# Altium footprint library Package_DFN_QFN.PcbLib: 735 footprints (part 46 of 46)
Each footprint in its own frame and in the unit in brackets; x right, y up, seen from the top. Pads: shape width x height; smd on the part's side, far side on the other; paste and mask are expansions set on the pad; w line width, h text height; cw(c..) or ccw(c..) is an arc to the next point about the centre after c.
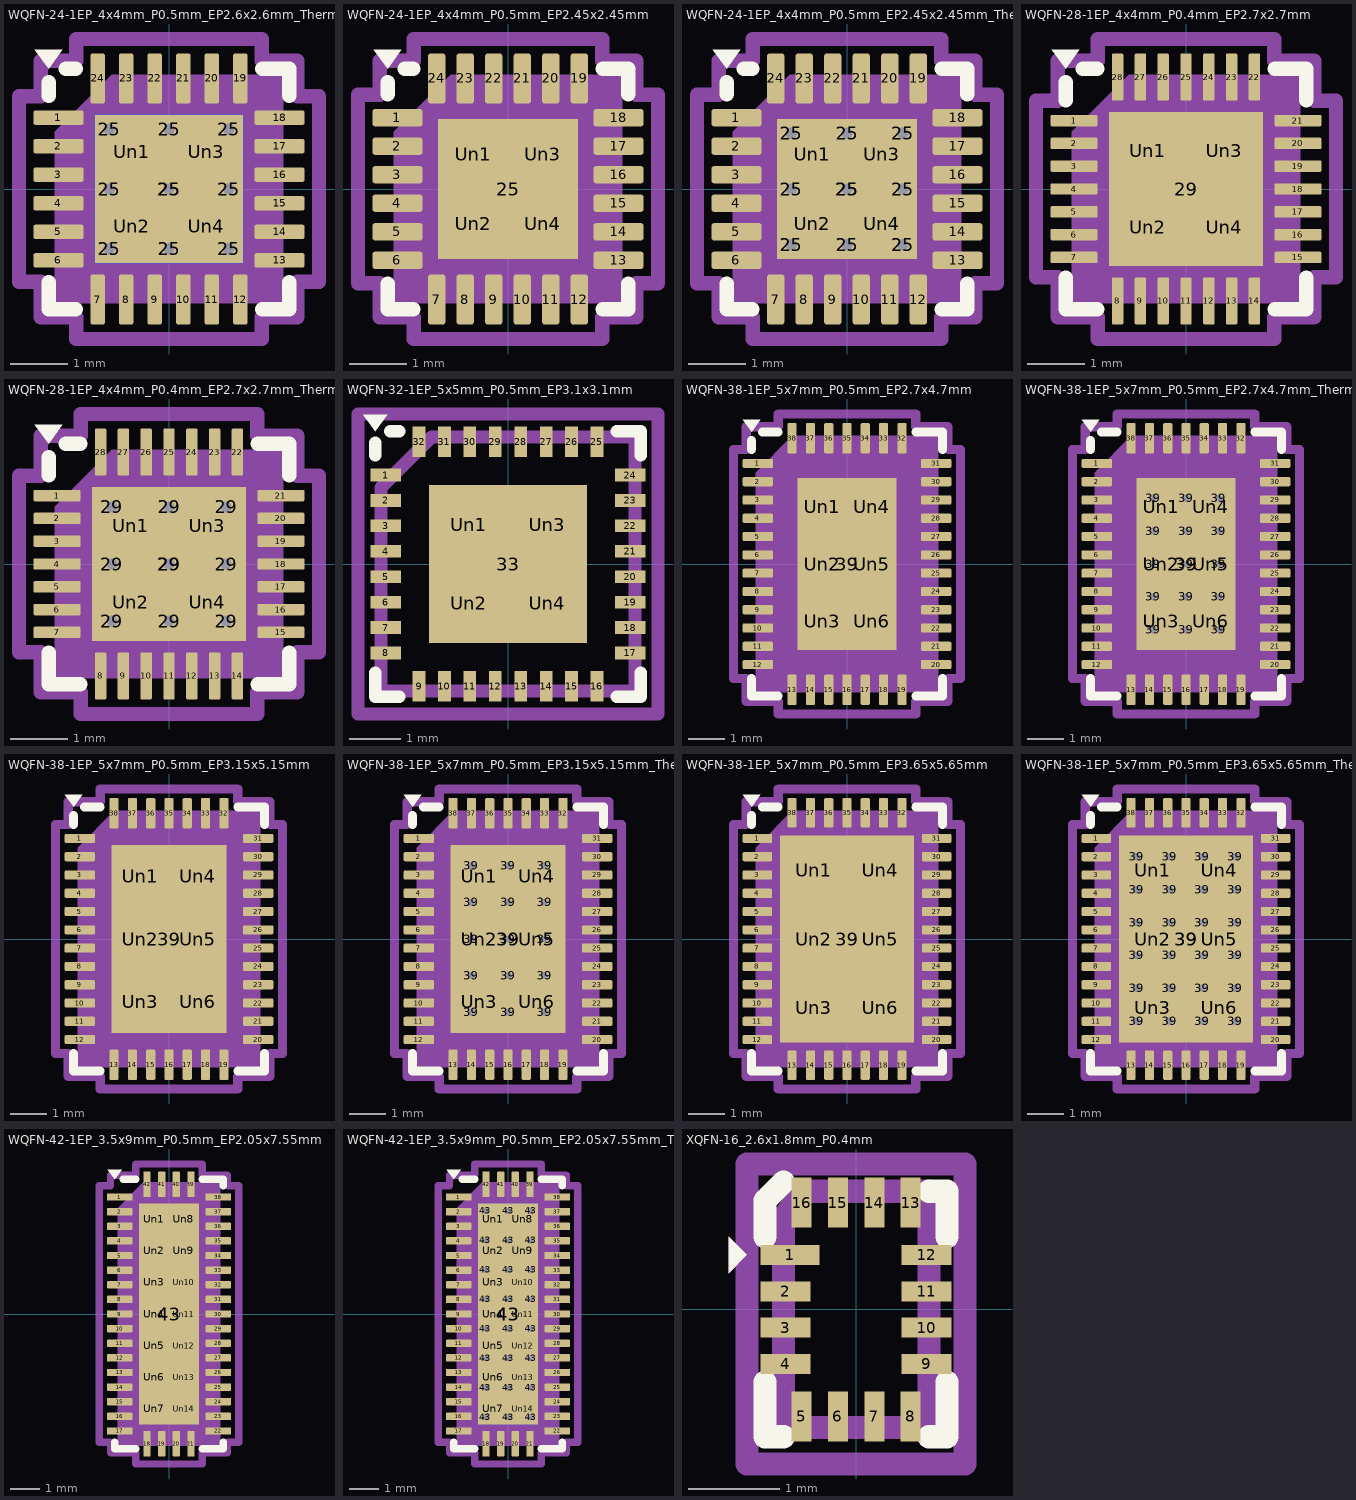
[diagram p45: the footprints below, top view; thin cyan lines are the x and y axes]

## WQFN-24-1EP_4x4mm_P0.5mm_EP2.6x2.6mm_ThermalVias [mm] "WQFN-24-1EP_4x4mm_P0.5mm_EP2.6x2.6mm_ThermalVias"
pads (39):
  rrect25% 0.875x0.25 smd: 1(-1.937,1.25) 2(-1.937,0.75) 3(-1.937,0.25) 4(-1.937,-0.25) 5(-1.937,-0.75) 6(-1.937,-1.25) 13(1.937,-1.25) 14(1.937,-0.75) 15(1.937,-0.25) 16(1.937,0.25) 17(1.937,0.75) 18(1.937,1.25)
  rrect25% 0.25x0.875 smd: 7(-1.25,-1.937) 8(-0.75,-1.937) 9(-0.25,-1.937) 10(0.25,-1.937) 11(0.75,-1.937) 12(1.25,-1.937) 19(1.25,1.937) 20(0.75,1.937) 21(0.25,1.937) 22(-0.25,1.937) 23(-0.75,1.937) 24(-1.25,1.937)
  round 0.5 hole 0.2: 25(-1.05,-1.05) 25(-1.05,0) 25(-1.05,1.05) 25(0,-1.05) 25(0,0) 25(0,1.05) 25(1.05,-1.05) 25(1.05,0) 25(1.05,1.05)
  rect 2.6x2.6 smd: 25(0,0)
  rect 2.6x2.6 smd far side: 25(0,0)
  rrect22% 1.13x1.13 on Top Paste: Un1(-0.65,0.65) Un2(-0.65,-0.65) Un3(0.65,0.65) Un4(0.65,-0.65)
F.SilkS:
  region: -2.11,2.11 -2.35,2.44 -1.87,2.44
  lines w0.254: -2.11,-1.635 -2.11,-2.11 -1.635,-2.11 ; -2.11,1.635 -2.11,1.87 ; -1.81,2.11 -1.635,2.11 ; 1.635,-2.11 2.11,-2.11 2.11,-1.635 ; 1.635,2.11 2.11,2.11 2.11,1.635
Top Component Center:
  lines w0.127: -0.127,0 0.127,0 -0.127,0 ; 0,-0.127 0,0.127 0,-0.127
Top Assembly:
  region: 2,-2 -2,-2 -2,1 -1,2 2,2
Top Courtyard:
  lines w0.254: -2.63,-1.63 -2.25,-1.63 -2.25,-2.25 -1.63,-2.25 -1.63,-2.63 1.63,-2.63 1.63,-2.25 2.25,-2.25 2.25,-1.63 2.63,-1.63 2.63,1.63 2.25,1.63 2.25,2.25 1.63,2.25 1.63,2.63 -1.63,2.63 -1.63,2.25 -2.25,2.25 -2.25,1.63 -2.63,1.63 -2.63,-1.63
Top Designator:
  text ".Designator" at -3.43,-0.344 h1.52

## WQFN-24-1EP_4x4mm_P0.5mm_EP2.45x2.45mm [mm] "WQFN-24-1EP_4x4mm_P0.5mm_EP2.45x2.45mm"
pads (29):
  rrect25% 0.875x0.3 smd: 1(-1.937,1.25) 2(-1.937,0.75) 3(-1.937,0.25) 4(-1.937,-0.25) 5(-1.937,-0.75) 6(-1.937,-1.25) 13(1.937,-1.25) 14(1.937,-0.75) 15(1.937,-0.25) 16(1.937,0.25) 17(1.937,0.75) 18(1.937,1.25)
  rrect25% 0.3x0.875 smd: 7(-1.25,-1.937) 8(-0.75,-1.937) 9(-0.25,-1.937) 10(0.25,-1.937) 11(0.75,-1.937) 12(1.25,-1.937) 19(1.25,1.937) 20(0.75,1.937) 21(0.25,1.937) 22(-0.25,1.937) 23(-0.75,1.937) 24(-1.25,1.937)
  rect 2.45x2.45 smd: 25(0,0)
  rrect25% 0.99x0.99 on Top Paste: Un1(-0.61,0.61) Un2(-0.61,-0.61) Un3(0.61,0.61) Un4(0.61,-0.61)
F.SilkS:
  region: -2.11,2.11 -2.35,2.44 -1.87,2.44
  lines w0.254: -2.11,-1.66 -2.11,-2.11 -1.66,-2.11 ; -2.11,1.66 -2.11,1.87 ; -1.81,2.11 -1.66,2.11 ; 1.66,-2.11 2.11,-2.11 2.11,-1.66 ; 1.66,2.11 2.11,2.11 2.11,1.66
Top Component Center:
  lines w0.127: -0.127,0 0.127,0 -0.127,0 ; 0,-0.127 0,0.127 0,-0.127
Top Assembly:
  region: 2,-2 -2,-2 -2,1 -1,2 2,2
Top Courtyard:
  lines w0.254: -2.63,-1.65 -2.25,-1.65 -2.25,-2.25 -1.65,-2.25 -1.65,-2.63 1.65,-2.63 1.65,-2.25 2.25,-2.25 2.25,-1.65 2.63,-1.65 2.63,1.65 2.25,1.65 2.25,2.25 1.65,2.25 1.65,2.63 -1.65,2.63 -1.65,2.25 -2.25,2.25 -2.25,1.65 -2.63,1.65 -2.63,-1.65
Top Designator:
  text ".Designator" at -3.43,-0.344 h1.52

## WQFN-24-1EP_4x4mm_P0.5mm_EP2.45x2.45mm_ThermalVias [mm] "WQFN-24-1EP_4x4mm_P0.5mm_EP2.45x2.45mm_ThermalVias"
pads (39):
  rrect25% 0.875x0.3 smd: 1(-1.937,1.25) 2(-1.937,0.75) 3(-1.937,0.25) 4(-1.937,-0.25) 5(-1.937,-0.75) 6(-1.937,-1.25) 13(1.937,-1.25) 14(1.937,-0.75) 15(1.937,-0.25) 16(1.937,0.25) 17(1.937,0.75) 18(1.937,1.25)
  rrect25% 0.3x0.875 smd: 7(-1.25,-1.937) 8(-0.75,-1.937) 9(-0.25,-1.937) 10(0.25,-1.937) 11(0.75,-1.937) 12(1.25,-1.937) 19(1.25,1.937) 20(0.75,1.937) 21(0.25,1.937) 22(-0.25,1.937) 23(-0.75,1.937) 24(-1.25,1.937)
  round 0.5 hole 0.2: 25(-0.975,-0.975) 25(-0.975,0) 25(-0.975,0.975) 25(0,-0.975) 25(0,0) 25(0,0.975) 25(0.975,-0.975) 25(0.975,0) 25(0.975,0.975)
  rect 2.45x2.45 smd: 25(0,0)
  rect 2.45x2.45 smd far side: 25(0,0)
  rrect24% 1.06x1.06 on Top Paste: Un1(-0.61,0.61) Un2(-0.61,-0.61) Un3(0.61,0.61) Un4(0.61,-0.61)
F.SilkS:
  region: -2.11,2.11 -2.35,2.44 -1.87,2.44
  lines w0.254: -2.11,-1.66 -2.11,-2.11 -1.66,-2.11 ; -2.11,1.66 -2.11,1.87 ; -1.81,2.11 -1.66,2.11 ; 1.66,-2.11 2.11,-2.11 2.11,-1.66 ; 1.66,2.11 2.11,2.11 2.11,1.66
Top Component Center:
  lines w0.127: -0.127,0 0.127,0 -0.127,0 ; 0,-0.127 0,0.127 0,-0.127
Top Assembly:
  region: 2,-2 -2,-2 -2,1 -1,2 2,2
Top Courtyard:
  lines w0.254: -2.63,-1.65 -2.25,-1.65 -2.25,-2.25 -1.65,-2.25 -1.65,-2.63 1.65,-2.63 1.65,-2.25 2.25,-2.25 2.25,-1.65 2.63,-1.65 2.63,1.65 2.25,1.65 2.25,2.25 1.65,2.25 1.65,2.63 -1.65,2.63 -1.65,2.25 -2.25,2.25 -2.25,1.65 -2.63,1.65 -2.63,-1.65
Top Designator:
  text ".Designator" at -3.43,-0.344 h1.52

## WQFN-28-1EP_4x4mm_P0.4mm_EP2.7x2.7mm [mm] "WQFN-28-1EP_4x4mm_P0.4mm_EP2.7x2.7mm"
pads (33):
  rrect25% 0.825x0.2 smd: 1(-1.963,1.2) 2(-1.963,0.8) 3(-1.963,0.4) 4(-1.963,0) 5(-1.963,-0.4) 6(-1.963,-0.8) 7(-1.963,-1.2) 15(1.963,-1.2) 16(1.963,-0.8) 17(1.963,-0.4) 18(1.963,0) 19(1.963,0.4) 20(1.963,0.8) 21(1.963,1.2)
  rrect25% 0.2x0.825 smd: 8(-1.2,-1.963) 9(-0.8,-1.963) 10(-0.4,-1.963) 11(0,-1.963) 12(0.4,-1.963) 13(0.8,-1.963) 14(1.2,-1.963) 22(1.2,1.963) 23(0.8,1.963) 24(0.4,1.963) 25(0,1.963) 26(-0.4,1.963) 27(-0.8,1.963) 28(-1.2,1.963)
  rect 2.7x2.7 smd: 29(0,0)
  rrect23% 1.09x1.09 on Top Paste: Un1(-0.675,0.675) Un2(-0.675,-0.675) Un3(0.675,0.675) Un4(0.675,-0.675)
F.SilkS:
  region: -2.11,2.11 -2.35,2.44 -1.87,2.44
  lines w0.254: -2.11,-1.56 -2.11,-2.11 -1.56,-2.11 ; -2.11,1.56 -2.11,1.87 ; -1.81,2.11 -1.56,2.11 ; 1.56,-2.11 2.11,-2.11 2.11,-1.56 ; 1.56,2.11 2.11,2.11 2.11,1.56
Top Component Center:
  lines w0.127: -0.127,0 0.127,0 -0.127,0 ; 0,-0.127 0,0.127 0,-0.127
Top Assembly:
  region: 2,-2 -2,-2 -2,1 -1,2 2,2
Top Courtyard:
  lines w0.254: -2.63,-1.55 -2.25,-1.55 -2.25,-2.25 -1.55,-2.25 -1.55,-2.63 1.55,-2.63 1.55,-2.25 2.25,-2.25 2.25,-1.55 2.63,-1.55 2.63,1.55 2.25,1.55 2.25,2.25 1.55,2.25 1.55,2.63 -1.55,2.63 -1.55,2.25 -2.25,2.25 -2.25,1.55 -2.63,1.55 -2.63,-1.55
Top Designator:
  text ".Designator" at -3.43,-0.344 h1.52

## WQFN-28-1EP_4x4mm_P0.4mm_EP2.7x2.7mm_ThermalVias [mm] "WQFN-28-1EP_4x4mm_P0.4mm_EP2.7x2.7mm_ThermalVias"
pads (43):
  rrect25% 0.825x0.2 smd: 1(-1.963,1.2) 2(-1.963,0.8) 3(-1.963,0.4) 4(-1.963,0) 5(-1.963,-0.4) 6(-1.963,-0.8) 7(-1.963,-1.2) 15(1.963,-1.2) 16(1.963,-0.8) 17(1.963,-0.4) 18(1.963,0) 19(1.963,0.4) 20(1.963,0.8) 21(1.963,1.2)
  rrect25% 0.2x0.825 smd: 8(-1.2,-1.963) 9(-0.8,-1.963) 10(-0.4,-1.963) 11(0,-1.963) 12(0.4,-1.963) 13(0.8,-1.963) 14(1.2,-1.963) 22(1.2,1.963) 23(0.8,1.963) 24(0.4,1.963) 25(0,1.963) 26(-0.4,1.963) 27(-0.8,1.963) 28(-1.2,1.963)
  round 0.5 hole 0.2: 29(-1,-1) 29(-1,0) 29(-1,1) 29(0,-1) 29(0,0) 29(0,1) 29(1,-1) 29(1,0) 29(1,1)
  rect 2.7x2.7 smd: 29(0,0)
  rect 2.5x2.5 smd far side: 29(0,0)
  rrect23% 1.09x1.09 on Top Paste: Un1(-0.675,0.675) Un2(-0.675,-0.675) Un3(0.675,0.675) Un4(0.675,-0.675)
F.SilkS:
  region: -2.11,2.11 -2.35,2.44 -1.87,2.44
  lines w0.254: -2.11,-1.56 -2.11,-2.11 -1.56,-2.11 ; -2.11,1.56 -2.11,1.87 ; -1.81,2.11 -1.56,2.11 ; 1.56,-2.11 2.11,-2.11 2.11,-1.56 ; 1.56,2.11 2.11,2.11 2.11,1.56
Top Component Center:
  lines w0.127: -0.127,0 0.127,0 -0.127,0 ; 0,-0.127 0,0.127 0,-0.127
Top Assembly:
  region: 2,-2 -2,-2 -2,1 -1,2 2,2
Top Courtyard:
  lines w0.254: -2.63,-1.55 -2.25,-1.55 -2.25,-2.25 -1.55,-2.25 -1.55,-2.63 1.55,-2.63 1.55,-2.25 2.25,-2.25 2.25,-1.55 2.63,-1.55 2.63,1.55 2.25,1.55 2.25,2.25 1.55,2.25 1.55,2.63 -1.55,2.63 -1.55,2.25 -2.25,2.25 -2.25,1.55 -2.63,1.55 -2.63,-1.55
Top Designator:
  text ".Designator" at -3.43,-0.344 h1.52

## WQFN-32-1EP_5x5mm_P0.5mm_EP3.1x3.1mm [mm] "WQFN-32-1EP_5x5mm_P0.5mm_EP3.1x3.1mm"
pads (37):
  rect 0.6x0.25 smd: 1(-2.4,1.75) 2(-2.4,1.25) 3(-2.4,0.75) 4(-2.4,0.25) 5(-2.4,-0.25) 6(-2.4,-0.75) 7(-2.4,-1.25) 8(-2.4,-1.75) 17(2.4,-1.75) 18(2.4,-1.25) 19(2.4,-0.75) 20(2.4,-0.25) 21(2.4,0.25) 22(2.4,0.75) 23(2.4,1.25) 24(2.4,1.75)
  rect 0.25x0.6 smd: 9(-1.75,-2.4) 10(-1.25,-2.4) 11(-0.75,-2.4) 12(-0.25,-2.4) 13(0.25,-2.4) 14(0.75,-2.4) 15(1.25,-2.4) 16(1.75,-2.4) 25(1.75,2.4) 26(1.25,2.4) 27(0.75,2.4) 28(0.25,2.4) 29(-0.25,2.4) 30(-0.75,2.4) 31(-1.25,2.4) 32(-1.75,2.4)
  rect 3.1x3.1 smd: 33(0,0)
  rect 1.23x1.23 on Top Paste: Un1(-0.775,0.775) Un2(-0.775,-0.775) Un3(0.775,0.775) Un4(0.775,-0.775)
F.SilkS:
  region: -2.61,2.61 -2.85,2.94 -2.37,2.94
  lines w0.254: -2.61,-2.14 -2.61,-2.61 -2.14,-2.61 ; -2.61,2.14 -2.61,2.378 ; -2.31,2.61 -2.14,2.61 ; 2.14,-2.61 2.61,-2.61 2.61,-2.14 ; 2.14,2.61 2.61,2.61 2.61,2.14
Top Component Center:
  lines w0.127: -0.127,0 0.127,0 -0.127,0 ; 0,-0.127 0,0.127 0,-0.127
Top Assembly:
  lines w0.254: -2.5,-2.5 2.5,-2.5 2.5,2.5 -1.5,2.5 -2.5,1.5 -2.5,-2.5
Top Courtyard:
  lines w0.254: -2.95,-2.95 2.95,-2.95 2.95,2.95 -2.95,2.95 -2.95,-2.95
Top Designator:
  text ".Designator" at -3.43,-0.344 h1.52

## WQFN-38-1EP_5x7mm_P0.5mm_EP2.7x4.7mm [mm] "WQFN-38-1EP_5x7mm_P0.5mm_EP2.7x4.7mm"
pads (45):
  rrect25% 0.825x0.25 smd: 1(-2.438,2.75) 2(-2.438,2.25) 3(-2.438,1.75) 4(-2.438,1.25) 5(-2.438,0.75) 6(-2.438,0.25) 7(-2.438,-0.25) 8(-2.438,-0.75) 9(-2.438,-1.25) 10(-2.438,-1.75) 11(-2.438,-2.25) 12(-2.438,-2.75) 20(2.438,-2.75) 21(2.438,-2.25) 22(2.438,-1.75) 23(2.438,-1.25) 24(2.438,-0.75) 25(2.438,-0.25) 26(2.438,0.25) 27(2.438,0.75) 28(2.438,1.25) 29(2.438,1.75) 30(2.438,2.25) 31(2.438,2.75)
  rrect25% 0.25x0.825 smd: 13(-1.5,-3.437) 14(-1,-3.437) 15(-0.5,-3.437) 16(0,-3.437) 17(0.5,-3.437) 18(1,-3.437) 19(1.5,-3.437) 32(1.5,3.437) 33(1,3.437) 34(0.5,3.437) 35(0,3.437) 36(-0.5,3.437) 37(-1,3.437) 38(-1.5,3.437)
  rect 2.7x4.7 smd: 39(0,0)
  rrect23% 1.09x1.26 on Top Paste: Un1(-0.675,1.57) Un2(-0.675,0) Un3(-0.675,-1.57) Un4(0.675,1.57) Un5(0.675,0) Un6(0.675,-1.57)
F.SilkS:
  region: -2.61,3.61 -2.85,3.94 -2.37,3.94
  lines w0.254: -2.61,-3.135 -2.61,-3.61 -1.885,-3.61 ; -2.61,3.135 -2.61,3.37 ; -2.31,3.61 -1.885,3.61 ; 1.885,-3.61 2.61,-3.61 2.61,-3.135 ; 1.885,3.61 2.61,3.61 2.61,3.135
Top Component Center:
  lines w0.127: -0.127,0 0.127,0 -0.127,0 ; 0,-0.127 0,0.127 0,-0.127
Top Assembly:
  region: 2.5,-3.5 -2.5,-3.5 -2.5,2.5 -1.5,3.5 2.5,3.5
Top Courtyard:
  lines w0.254: -3.1,-3.13 -2.75,-3.13 -2.75,-3.75 -1.88,-3.75 -1.88,-4.1 1.88,-4.1 1.88,-3.75 2.75,-3.75 2.75,-3.13 3.1,-3.13 3.1,3.13 2.75,3.13 2.75,3.75 1.88,3.75 1.88,4.1 -1.88,4.1 -1.88,3.75 -2.75,3.75 -2.75,3.13 -3.1,3.13 -3.1,-3.13
Top Designator:
  text ".Designator" at -3.43,-0.344 h1.52
3D body "WQFN-38-1EP_5x7mm_P0.5mm_EP3.15x5.15mm.step": height 0.77, standoff 0, extent -2.5,-3.5 2.5,3.5

## WQFN-38-1EP_5x7mm_P0.5mm_EP2.7x4.7mm_ThermalVias [mm] "WQFN-38-1EP_5x7mm_P0.5mm_EP2.7x4.7mm_ThermalVias"
pads (61):
  rrect25% 0.825x0.25 smd: 1(-2.438,2.75) 2(-2.438,2.25) 3(-2.438,1.75) 4(-2.438,1.25) 5(-2.438,0.75) 6(-2.438,0.25) 7(-2.438,-0.25) 8(-2.438,-0.75) 9(-2.438,-1.25) 10(-2.438,-1.75) 11(-2.438,-2.25) 12(-2.438,-2.75) 20(2.438,-2.75) 21(2.438,-2.25) 22(2.438,-1.75) 23(2.438,-1.25) 24(2.438,-0.75) 25(2.438,-0.25) 26(2.438,0.25) 27(2.438,0.75) 28(2.438,1.25) 29(2.438,1.75) 30(2.438,2.25) 31(2.438,2.75)
  rrect25% 0.25x0.825 smd: 13(-1.5,-3.437) 14(-1,-3.437) 15(-0.5,-3.437) 16(0,-3.437) 17(0.5,-3.437) 18(1,-3.437) 19(1.5,-3.437) 32(1.5,3.437) 33(1,3.437) 34(0.5,3.437) 35(0,3.437) 36(-0.5,3.437) 37(-1,3.437) 38(-1.5,3.437)
  round 0.5 hole 0.2: 39(-0.9,-1.8) 39(-0.9,-0.9) 39(-0.9,0) 39(-0.9,0.9) 39(-0.9,1.8) 39(0,-1.8) 39(0,-0.9) 39(0,0) 39(0,0.9) 39(0,1.8) 39(0.9,-1.8) 39(0.9,-0.9) 39(0.9,0) 39(0.9,0.9) 39(0.9,1.8)
  rect 2.7x4.7 smd: 39(0,0)
  rect 2.3x4.1 smd far side: 39(0,0)
  rrect23% 1.09x1.26 on Top Paste: Un1(-0.675,1.57) Un2(-0.675,0) Un3(-0.675,-1.57) Un4(0.675,1.57) Un5(0.675,0) Un6(0.675,-1.57)
F.SilkS:
  region: -2.61,3.61 -2.85,3.94 -2.37,3.94
  lines w0.254: -2.61,-3.135 -2.61,-3.61 -1.885,-3.61 ; -2.61,3.135 -2.61,3.37 ; -2.31,3.61 -1.885,3.61 ; 1.885,-3.61 2.61,-3.61 2.61,-3.135 ; 1.885,3.61 2.61,3.61 2.61,3.135
Top Component Center:
  lines w0.127: -0.127,0 0.127,0 -0.127,0 ; 0,-0.127 0,0.127 0,-0.127
Top Assembly:
  region: 2.5,-3.5 -2.5,-3.5 -2.5,2.5 -1.5,3.5 2.5,3.5
Top Courtyard:
  lines w0.254: -3.1,-3.13 -2.75,-3.13 -2.75,-3.75 -1.88,-3.75 -1.88,-4.1 1.88,-4.1 1.88,-3.75 2.75,-3.75 2.75,-3.13 3.1,-3.13 3.1,3.13 2.75,3.13 2.75,3.75 1.88,3.75 1.88,4.1 -1.88,4.1 -1.88,3.75 -2.75,3.75 -2.75,3.13 -3.1,3.13 -3.1,-3.13
Top Designator:
  text ".Designator" at -3.43,-0.344 h1.52

## WQFN-38-1EP_5x7mm_P0.5mm_EP3.15x5.15mm [mm] "WQFN-38-1EP_5x7mm_P0.5mm_EP3.15x5.15mm"
pads (45):
  rrect25% 0.825x0.25 smd: 1(-2.438,2.75) 2(-2.438,2.25) 3(-2.438,1.75) 4(-2.438,1.25) 5(-2.438,0.75) 6(-2.438,0.25) 7(-2.438,-0.25) 8(-2.438,-0.75) 9(-2.438,-1.25) 10(-2.438,-1.75) 11(-2.438,-2.25) 12(-2.438,-2.75) 20(2.438,-2.75) 21(2.438,-2.25) 22(2.438,-1.75) 23(2.438,-1.25) 24(2.438,-0.75) 25(2.438,-0.25) 26(2.438,0.25) 27(2.438,0.75) 28(2.438,1.25) 29(2.438,1.75) 30(2.438,2.25) 31(2.438,2.75)
  rrect25% 0.25x0.825 smd: 13(-1.5,-3.437) 14(-1,-3.437) 15(-0.5,-3.437) 16(0,-3.437) 17(0.5,-3.437) 18(1,-3.437) 19(1.5,-3.437) 32(1.5,3.437) 33(1,3.437) 34(0.5,3.437) 35(0,3.437) 36(-0.5,3.437) 37(-1,3.437) 38(-1.5,3.437)
  rect 3.15x5.15 smd: 39(0,0)
  rrect20% 1.27x1.38 on Top Paste: Un1(-0.79,1.72) Un2(-0.79,0) Un3(-0.79,-1.72) Un4(0.79,1.72) Un5(0.79,0) Un6(0.79,-1.72)
F.SilkS:
  region: -2.61,3.61 -2.85,3.94 -2.37,3.94
  lines w0.254: -2.61,-3.135 -2.61,-3.61 -1.885,-3.61 ; -2.61,3.135 -2.61,3.37 ; -2.31,3.61 -1.885,3.61 ; 1.885,-3.61 2.61,-3.61 2.61,-3.135 ; 1.885,3.61 2.61,3.61 2.61,3.135
Top Component Center:
  lines w0.127: -0.127,0 0.127,0 -0.127,0 ; 0,-0.127 0,0.127 0,-0.127
Top Assembly:
  region: 2.5,-3.5 -2.5,-3.5 -2.5,2.5 -1.5,3.5 2.5,3.5
Top Courtyard:
  lines w0.254: -3.1,-3.13 -2.75,-3.13 -2.75,-3.75 -1.88,-3.75 -1.88,-4.1 1.88,-4.1 1.88,-3.75 2.75,-3.75 2.75,-3.13 3.1,-3.13 3.1,3.13 2.75,3.13 2.75,3.75 1.88,3.75 1.88,4.1 -1.88,4.1 -1.88,3.75 -2.75,3.75 -2.75,3.13 -3.1,3.13 -3.1,-3.13
Top Designator:
  text ".Designator" at -3.43,-0.344 h1.52
3D body "WQFN-38-1EP_5x7mm_P0.5mm_EP3.15x5.15mm.step": height 0.77, standoff 0, extent -2.5,-3.5 2.5,3.5

## WQFN-38-1EP_5x7mm_P0.5mm_EP3.15x5.15mm_ThermalVias [mm] "WQFN-38-1EP_5x7mm_P0.5mm_EP3.15x5.15mm_ThermalVias"
pads (61):
  rrect25% 0.825x0.25 smd: 1(-2.438,2.75) 2(-2.438,2.25) 3(-2.438,1.75) 4(-2.438,1.25) 5(-2.438,0.75) 6(-2.438,0.25) 7(-2.438,-0.25) 8(-2.438,-0.75) 9(-2.438,-1.25) 10(-2.438,-1.75) 11(-2.438,-2.25) 12(-2.438,-2.75) 20(2.438,-2.75) 21(2.438,-2.25) 22(2.438,-1.75) 23(2.438,-1.25) 24(2.438,-0.75) 25(2.438,-0.25) 26(2.438,0.25) 27(2.438,0.75) 28(2.438,1.25) 29(2.438,1.75) 30(2.438,2.25) 31(2.438,2.75)
  rrect25% 0.25x0.825 smd: 13(-1.5,-3.437) 14(-1,-3.437) 15(-0.5,-3.437) 16(0,-3.437) 17(0.5,-3.437) 18(1,-3.437) 19(1.5,-3.437) 32(1.5,3.437) 33(1,3.437) 34(0.5,3.437) 35(0,3.437) 36(-0.5,3.437) 37(-1,3.437) 38(-1.5,3.437)
  round 0.5 hole 0.2: 39(-1,-2) 39(-1,-1) 39(-1,0) 39(-1,1) 39(-1,2) 39(0,-2) 39(0,-1) 39(0,0) 39(0,1) 39(0,2) 39(1,-2) 39(1,-1) 39(1,0) 39(1,1) 39(1,2)
  rect 3.15x5.15 smd: 39(0,0)
  rect 2.5x4.5 smd far side: 39(0,0)
  rrect20% 1.27x1.38 on Top Paste: Un1(-0.79,1.72) Un2(-0.79,0) Un3(-0.79,-1.72) Un4(0.79,1.72) Un5(0.79,0) Un6(0.79,-1.72)
F.SilkS:
  region: -2.61,3.61 -2.85,3.94 -2.37,3.94
  lines w0.254: -2.61,-3.135 -2.61,-3.61 -1.885,-3.61 ; -2.61,3.135 -2.61,3.37 ; -2.31,3.61 -1.885,3.61 ; 1.885,-3.61 2.61,-3.61 2.61,-3.135 ; 1.885,3.61 2.61,3.61 2.61,3.135
Top Component Center:
  lines w0.127: -0.127,0 0.127,0 -0.127,0 ; 0,-0.127 0,0.127 0,-0.127
Top Assembly:
  region: 2.5,-3.5 -2.5,-3.5 -2.5,2.5 -1.5,3.5 2.5,3.5
Top Courtyard:
  lines w0.254: -3.1,-3.13 -2.75,-3.13 -2.75,-3.75 -1.88,-3.75 -1.88,-4.1 1.88,-4.1 1.88,-3.75 2.75,-3.75 2.75,-3.13 3.1,-3.13 3.1,3.13 2.75,3.13 2.75,3.75 1.88,3.75 1.88,4.1 -1.88,4.1 -1.88,3.75 -2.75,3.75 -2.75,3.13 -3.1,3.13 -3.1,-3.13
Top Designator:
  text ".Designator" at -3.43,-0.344 h1.52
3D body "WQFN-38-1EP_5x7mm_P0.5mm_EP3.15x5.15mm.step": height 0.77, standoff 0, extent -2.5,-3.5 2.5,3.5

## WQFN-38-1EP_5x7mm_P0.5mm_EP3.65x5.65mm [mm] "WQFN-38-1EP_5x7mm_P0.5mm_EP3.65x5.65mm"
pads (45):
  rrect25% 0.8x0.25 smd: 1(-2.45,2.75) 2(-2.45,2.25) 3(-2.45,1.75) 4(-2.45,1.25) 5(-2.45,0.75) 6(-2.45,0.25) 7(-2.45,-0.25) 8(-2.45,-0.75) 9(-2.45,-1.25) 10(-2.45,-1.75) 11(-2.45,-2.25) 12(-2.45,-2.75) 20(2.45,-2.75) 21(2.45,-2.25) 22(2.45,-1.75) 23(2.45,-1.25) 24(2.45,-0.75) 25(2.45,-0.25) 26(2.45,0.25) 27(2.45,0.75) 28(2.45,1.25) 29(2.45,1.75) 30(2.45,2.25) 31(2.45,2.75)
  rrect25% 0.25x0.8 smd: 13(-1.5,-3.45) 14(-1,-3.45) 15(-0.5,-3.45) 16(0,-3.45) 17(0.5,-3.45) 18(1,-3.45) 19(1.5,-3.45) 32(1.5,3.45) 33(1,3.45) 34(0.5,3.45) 35(0,3.45) 36(-0.5,3.45) 37(-1,3.45) 38(-1.5,3.45)
  rect 3.65x5.65 smd: 39(0,0)
  rrect17% 1.47x1.52 on Top Paste: Un1(-0.91,1.88) Un2(-0.91,0) Un3(-0.91,-1.88) Un4(0.91,1.88) Un5(0.91,0) Un6(0.91,-1.88)
F.SilkS:
  region: -2.61,3.61 -2.85,3.94 -2.37,3.94
  lines w0.254: -2.61,-3.135 -2.61,-3.61 -1.885,-3.61 ; -2.61,3.135 -2.61,3.37 ; -2.31,3.61 -1.885,3.61 ; 1.885,-3.61 2.61,-3.61 2.61,-3.135 ; 1.885,3.61 2.61,3.61 2.61,3.135
Top Component Center:
  lines w0.127: -0.127,0 0.127,0 -0.127,0 ; 0,-0.127 0,0.127 0,-0.127
Top Assembly:
  region: 2.5,-3.5 -2.5,-3.5 -2.5,2.5 -1.5,3.5 2.5,3.5
Top Courtyard:
  lines w0.254: -3.1,-3.13 -3.1,3.13 -2.75,3.13 -2.75,3.75 -1.88,3.75 -1.88,4.1 1.88,4.1 1.88,3.75 2.75,3.75 2.75,3.13 3.1,3.13 3.1,-3.13 2.75,-3.13 2.75,-3.75 1.88,-3.75 1.88,-4.1 -1.88,-4.1 -1.88,-3.75 -2.75,-3.75 -2.75,-3.13 -3.1,-3.13
Top Designator:
  text ".Designator" at -3.43,-0.344 h1.52
3D body "WQFN-38-1EP_5x7mm_P0.5mm_EP3.15x5.15mm.step": height 0.77, standoff 0, extent -2.5,-3.5 2.5,3.5

## WQFN-38-1EP_5x7mm_P0.5mm_EP3.65x5.65mm_ThermalVias [mm] "WQFN-38-1EP_5x7mm_P0.5mm_EP3.65x5.65mm_ThermalVias"
pads (70):
  rrect25% 0.8x0.25 smd: 1(-2.45,2.75) 2(-2.45,2.25) 3(-2.45,1.75) 4(-2.45,1.25) 5(-2.45,0.75) 6(-2.45,0.25) 7(-2.45,-0.25) 8(-2.45,-0.75) 9(-2.45,-1.25) 10(-2.45,-1.75) 11(-2.45,-2.25) 12(-2.45,-2.75) 20(2.45,-2.75) 21(2.45,-2.25) 22(2.45,-1.75) 23(2.45,-1.25) 24(2.45,-0.75) 25(2.45,-0.25) 26(2.45,0.25) 27(2.45,0.75) 28(2.45,1.25) 29(2.45,1.75) 30(2.45,2.25) 31(2.45,2.75)
  rrect25% 0.25x0.8 smd: 13(-1.5,-3.45) 14(-1,-3.45) 15(-0.5,-3.45) 16(0,-3.45) 17(0.5,-3.45) 18(1,-3.45) 19(1.5,-3.45) 32(1.5,3.45) 33(1,3.45) 34(0.5,3.45) 35(0,3.45) 36(-0.5,3.45) 37(-1,3.45) 38(-1.5,3.45)
  round 0.5 hole 0.2: 39(-1.35,-2.25) 39(-1.35,-1.35) 39(-1.35,-0.45) 39(-1.35,0.45) 39(-1.35,1.35) 39(-1.35,2.25) 39(-0.45,-2.25) 39(-0.45,-1.35) 39(-0.45,-0.45) 39(-0.45,0.45) 39(-0.45,1.35) 39(-0.45,2.25) 39(0.45,-2.25) 39(0.45,-1.35) 39(0.45,-0.45) 39(0.45,0.45) 39(0.45,1.35) 39(0.45,2.25) 39(1.35,-2.25) 39(1.35,-1.35) 39(1.35,-0.45) 39(1.35,0.45) 39(1.35,1.35) 39(1.35,2.25)
  rect 3.65x5.65 smd: 39(0,0)
  rect 3.2x5 smd far side: 39(0,0)
  rrect16% 1.58x1.63 on Top Paste: Un1(-0.91,1.88) Un2(-0.91,0) Un3(-0.91,-1.88) Un4(0.91,1.88) Un5(0.91,0) Un6(0.91,-1.88)
F.SilkS:
  region: -2.61,3.61 -2.85,3.94 -2.37,3.94
  lines w0.254: -2.61,-3.135 -2.61,-3.61 -1.885,-3.61 ; -2.61,3.135 -2.61,3.37 ; -2.31,3.61 -1.885,3.61 ; 1.885,-3.61 2.61,-3.61 2.61,-3.135 ; 1.885,3.61 2.61,3.61 2.61,3.135
Top Component Center:
  lines w0.127: -0.127,0 0.127,0 -0.127,0 ; 0,-0.127 0,0.127 0,-0.127
Top Assembly:
  region: 2.5,-3.5 -2.5,-3.5 -2.5,2.5 -1.5,3.5 2.5,3.5
Top Courtyard:
  lines w0.254: -3.1,-3.13 -2.75,-3.13 -2.75,-3.75 -1.88,-3.75 -1.88,-4.1 1.88,-4.1 1.88,-3.75 2.75,-3.75 2.75,-3.13 3.1,-3.13 3.1,3.13 2.75,3.13 2.75,3.75 1.88,3.75 1.88,4.1 -1.88,4.1 -1.88,3.75 -2.75,3.75 -2.75,3.13 -3.1,3.13 -3.1,-3.13
Top Designator:
  text ".Designator" at -3.43,-0.344 h1.52
3D body "WQFN-38-1EP_5x7mm_P0.5mm_EP3.15x5.15mm.step": height 0.77, standoff 0, extent -2.5,-3.5 2.5,3.5

## WQFN-42-1EP_3.5x9mm_P0.5mm_EP2.05x7.55mm [mm] "WQFN-42-1EP_3.5x9mm_P0.5mm_EP2.05x7.55mm"
pads (57):
  rrect25% 0.875x0.25 smd: 1(-1.687,4) 2(-1.687,3.5) 3(-1.687,3) 4(-1.687,2.5) 5(-1.687,2) 6(-1.687,1.5) 7(-1.687,1) 8(-1.687,0.5) 9(-1.687,0) 10(-1.687,-0.5) 11(-1.687,-1) 12(-1.687,-1.5) 13(-1.687,-2) 14(-1.687,-2.5) 15(-1.687,-3) 16(-1.687,-3.5) 17(-1.687,-4) 22(1.687,-4) 23(1.687,-3.5) 24(1.687,-3) 25(1.687,-2.5) 26(1.687,-2) 27(1.687,-1.5) 28(1.687,-1) 29(1.687,-0.5) 30(1.687,0) 31(1.687,0.5) 32(1.687,1) 33(1.687,1.5) 34(1.687,2) 35(1.687,2.5) 36(1.687,3) 37(1.687,3.5) 38(1.687,4)
  rrect25% 0.25x0.875 smd: 18(-0.75,-4.437) 19(-0.25,-4.437) 20(0.25,-4.437) 21(0.75,-4.437) 39(0.75,4.437) 40(0.25,4.437) 41(-0.25,4.437) 42(-0.75,4.437)
  rect 2.05x7.55 smd: 43(0,0)
  rrect25% 0.83x0.87 on Top Paste: Un1(-0.51,3.24) Un2(-0.51,2.16) Un3(-0.51,1.08) Un4(-0.51,0) Un5(-0.51,-1.08) Un6(-0.51,-2.16) Un7(-0.51,-3.24) Un8(0.51,3.24) Un9(0.51,2.16) Un10(0.51,1.08) Un11(0.51,0) Un12(0.51,-1.08) Un13(0.51,-2.16) Un14(0.51,-3.24)
F.SilkS:
  region: -1.86,4.61 -2.1,4.94 -1.62,4.94
  lines w0.254: -1.86,-4.385 -1.86,-4.61 -1.135,-4.61 ; -1.56,4.61 -1.135,4.61 ; 1.135,-4.61 1.86,-4.61 1.86,-4.385 ; 1.135,4.61 1.86,4.61 1.86,4.385
Top Component Center:
  lines w0.127: -0.127,0 0.127,0 -0.127,0 ; 0,-0.127 0,0.127 0,-0.127
Top Assembly:
  region: 1.75,-4.5 -1.75,-4.5 -1.75,3.625 -0.875,4.5 1.75,4.5
Top Courtyard:
  lines w0.254: -2.38,-4.38 -2.38,4.38 -2,4.38 -2,4.75 -1.13,4.75 -1.13,5.13 1.13,5.13 1.13,4.75 2,4.75 2,4.38 2.38,4.38 2.38,-4.38 2,-4.38 2,-4.75 1.13,-4.75 1.13,-5.13 -1.13,-5.13 -1.13,-4.75 -2,-4.75 -2,-4.38 -2.38,-4.38
Top Designator:
  text ".Designator" at -3.43,-0.344 h1.52

## WQFN-42-1EP_3.5x9mm_P0.5mm_EP2.05x7.55mm_ThermalVias [mm] "WQFN-42-1EP_3.5x9mm_P0.5mm_EP2.05x7.55mm_ThermalVias"
pads (82):
  rrect25% 0.875x0.25 smd: 1(-1.687,4) 2(-1.687,3.5) 3(-1.687,3) 4(-1.687,2.5) 5(-1.687,2) 6(-1.687,1.5) 7(-1.687,1) 8(-1.687,0.5) 9(-1.687,0) 10(-1.687,-0.5) 11(-1.687,-1) 12(-1.687,-1.5) 13(-1.687,-2) 14(-1.687,-2.5) 15(-1.687,-3) 16(-1.687,-3.5) 17(-1.687,-4) 22(1.687,-4) 23(1.687,-3.5) 24(1.687,-3) 25(1.687,-2.5) 26(1.687,-2) 27(1.687,-1.5) 28(1.687,-1) 29(1.687,-0.5) 30(1.687,0) 31(1.687,0.5) 32(1.687,1) 33(1.687,1.5) 34(1.687,2) 35(1.687,2.5) 36(1.687,3) 37(1.687,3.5) 38(1.687,4)
  rrect25% 0.25x0.875 smd: 18(-0.75,-4.437) 19(-0.25,-4.437) 20(0.25,-4.437) 21(0.75,-4.437) 39(0.75,4.437) 40(0.25,4.437) 41(-0.25,4.437) 42(-0.75,4.437)
  round 0.5 hole 0.2: 43(-0.775,-3.525) 43(-0.775,-2.518) 43(-0.775,-1.511) 43(-0.775,-0.504) 43(-0.775,0.504) 43(-0.775,1.511) 43(-0.775,2.518) 43(-0.775,3.525) 43(0,-3.525) 43(0,-2.518) 43(0,-1.511) 43(0,-0.504) 43(0,0.504) 43(0,1.511) 43(0,2.518) 43(0,3.525) 43(0.775,-3.525) 43(0.775,-2.518) 43(0.775,-1.511) 43(0.775,-0.504) 43(0.775,0.504) 43(0.775,1.511) 43(0.775,2.518) 43(0.775,3.525)
  rect 2.05x7.55 smd: 43(0,0)
  rect 2.05x7.55 smd far side: 43(0,0)
  rrect25% 0.83x0.87 on Top Paste: Un1(-0.51,3.24) Un2(-0.51,2.16) Un3(-0.51,1.08) Un4(-0.51,0) Un5(-0.51,-1.08) Un6(-0.51,-2.16) Un7(-0.51,-3.24) Un8(0.51,3.24) Un9(0.51,2.16) Un10(0.51,1.08) Un11(0.51,0) Un12(0.51,-1.08) Un13(0.51,-2.16) Un14(0.51,-3.24)
F.SilkS:
  region: -1.86,4.61 -2.1,4.94 -1.62,4.94
  lines w0.254: -1.86,-4.385 -1.86,-4.61 -1.135,-4.61 ; -1.56,4.61 -1.135,4.61 ; 1.135,-4.61 1.86,-4.61 1.86,-4.385 ; 1.135,4.61 1.86,4.61 1.86,4.385
Top Component Center:
  lines w0.127: -0.127,0 0.127,0 -0.127,0 ; 0,-0.127 0,0.127 0,-0.127
Top Assembly:
  region: 1.75,-4.5 -1.75,-4.5 -1.75,3.625 -0.875,4.5 1.75,4.5
Top Courtyard:
  lines w0.254: -2.38,-4.38 -2.38,4.38 -2,4.38 -2,4.75 -1.13,4.75 -1.13,5.13 1.13,5.13 1.13,4.75 2,4.75 2,4.38 2.38,4.38 2.38,-4.38 2,-4.38 2,-4.75 1.13,-4.75 1.13,-5.13 -1.13,-5.13 -1.13,-4.75 -2,-4.75 -2,-4.38 -2.38,-4.38
Top Designator:
  text ".Designator" at -3.43,-0.344 h1.52

## XQFN-16_2.6x1.8mm_P0.4mm [mm]
pads (16):
  rect 0.65x0.22 smd: 1(-0.725,0.6)
  rect 0.55x0.22 smd: 2(-0.775,0.2) 3(-0.775,-0.2) 4(-0.775,-0.6) 9(0.775,-0.6) 10(0.775,-0.2) 11(0.775,0.2) 12(0.775,0.6)
  rect 0.22x0.55 smd: 5(-0.6,-1.175) 6(-0.2,-1.175) 7(0.2,-1.175) 8(0.6,-1.175) 13(0.6,1.175) 14(0.2,1.175) 15(-0.2,1.175) 16(-0.6,1.175)
F.SilkS:
  region: -1.2,0.6 -1.4,0.4 -1.4,0.8
  lines w0.254: -1,-0.8 -1,-1.4 -0.8,-1.4 ; -1,0.8 -1,1.2 -0.8,1.4 ; 0.8,-1.4 1,-1.4 1,-0.8 ; 0.8,1.3 1,1.3 1,0.8
Top Assembly:
  region: -1.2,0.6 -1.4,0.4 -1.4,0.8
  lines w0.254: -0.8,-1.3 -0.8,1 -0.6,1.3 0.8,1.3 0.8,-1.3 -0.8,-1.3
  text "'.Designator'" at -3.07,-0.287 h1.27
Top Courtyard:
  lines w0.254: -1.2,-1.7 -1.2,1.6 1.2,1.6 1.2,-1.7 -1.2,-1.7
Top Designator:
  text ".Designator" at -2.251,-0.226 h1
3D body "XQFN-16_2.6x1.8mm_P0.4mm.stp": height 0.5, standoff 0, extent -0.9,-1.3 0.9,1.3